# Altium schematic symbol library 8.0 - STM32.SCHLIB: 3 symbols
Pins are listed as number, name and electrical type; pins without a type are passive.

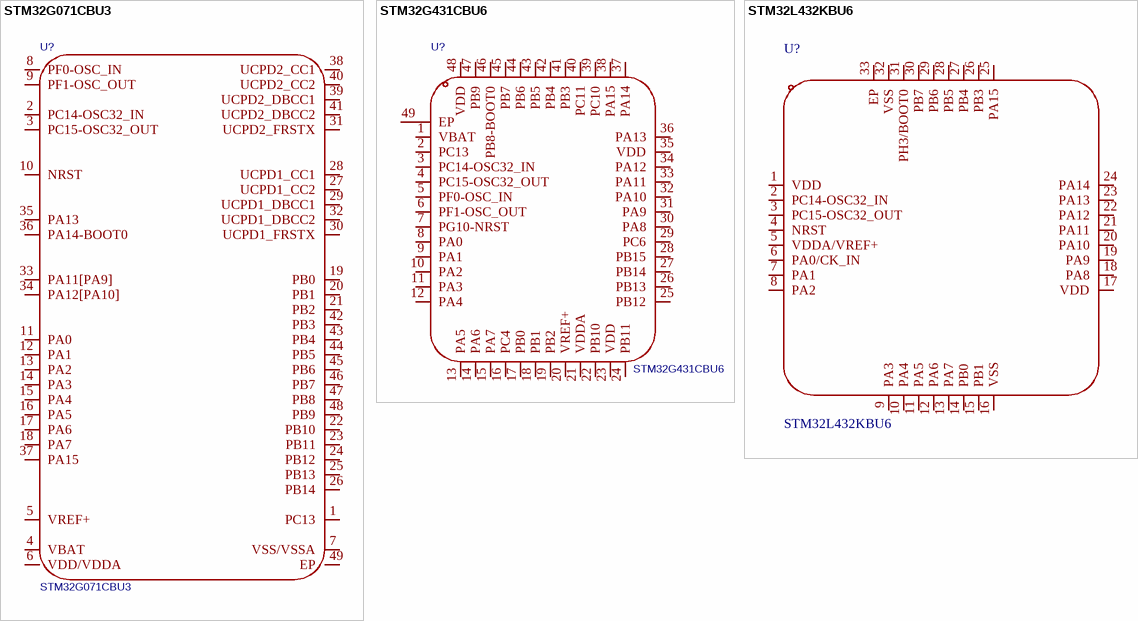
[diagram p0: symbols STM32G071CBU3 to STM32L432KBU6]

## STM32G071CBU3
designator U?
Manufacturer: ST(意法半导体); Device: STM32G071CBU3_1; AddInBom: yes; ModelId: 726e846686ee4a71b91fd16fb4ca286d聨0819f05c4eef4c71ace90d822a990e87; ModelName: UFQFPN-48_L7.0-W7.0-H0.6-P0.50; ModelTransform: 275.591,275.59,0,90,0,0,-0.003,-0.001,0; LCSC Part Name: STM32G071CBU3; SupplierPart: C724076; ManufacturerPart: STM32G071CBU3; Supplier Footprint: UFQFPN-48; JLCPCB Part Class: 扩展库; Datasheet: https://atta.szlcsc.com/upload/public/pdf/source/20200511/C529341_B4645443CFA701032F4478EC9851D5EF.pdf; Supplier: LCSC; ConvertToPcb: yes; SymbolName: STM32G071CBU3_1; FootprintName: UFQFPN-48_L7.0-W7.0-P0.50-BL-EP5.6
footprint VQFN-48_L7.0-W7.0-P0.50-BL-EP5.5
pins: 1 PC13, 2 PC14-OSC32_IN, 3 PC15-OSC32_OUT, 4 VBAT, 5 VREF+, 6 VDD/VDDA, 7 VSS/VSSA, 8 PF0-OSC_IN, 9 PF1-OSC_OUT, 10 NRST, 11 PA0, 12 PA1, 13 PA2, 14 PA3, 15 PA4, 16 PA5, 17 PA6, 18 PA7, 19 PB0, 20 PB1, 21 PB2, 22 PB10, 23 PB11, 24 PB12, 25 PB13, 26 PB14, 27 UCPD1_CC2, 28 UCPD1_CC1, 29 UCPD1_DBCC1, 30 UCPD1_FRSTX, 31 UCPD2_FRSTX, 32 UCPD1_DBCC2, 33 PA11[PA9], 34 PA12[PA10], 35 PA13, 36 PA14-BOOT0, 37 PA15, 38 UCPD2_CC1, 39 UCPD2_DBCC1, 40 UCPD2_CC2, 41 UCPD2_DBCC2, 42 PB3, 43 PB4, 44 PB5, 45 PB6, 46 PB7, 47 PB8, 48 PB9, 49 EP

## STM32G431CBU6
designator U?
CPU内核:ARM-M系列;CPU最大主频:170MHz;应用领域:-;; Manufacturer: ST(意法半导体); AddInBom: yes; ModelId: ba31957982b742979967eb5b855489b6; ModelName: VQFN-48_L7.0-W7.0-P0.50-BL-EP5.5; ModelTransform: 275.66874,275.66874,0,0,0,0,0,0,0; CPU Maximum Speed: 170MHz; Program Storage Size: 128KB; Program Memory Type: FLASH; Number of I/O: 42; ADC (Bit): 12bit; Voltage - Supply: 1.71V~3.6V; Symbol: STM32G431CBU6; Device: STM32G431CBU6; LCSC Part Name: 带DSP和FPU的170MHz主流ARM Cortex-M4 MCU，具有128 KB Flash存储器、数学加速器和中等模拟电平集成; SupplierPart: C529356; ManufacturerPart: STM32G431CBU6; Supplier Footprint: UFQFPN-48(7x7); JLCPCB Part Class: 扩展库; Datasheet: https://item.szlcsc.com/datasheet/STM32G431CBU6/549634.html; Supplier: LCSC; ConvertToPcb: yes; FootprintName: VQFN-48_L7.0-W7.0-P0.50-BL-EP5.5; CPU Core: ARM-M系列; DAC (Bit): 12bit; Applications: -
footprint VQFN-48_L7.0-W7.0-P0.50-BL-EP5.5
pins: 1 VBAT, 2 PC13, 3 PC14-OSC32_IN, 4 PC15-OSC32_OUT, 5 PF0-OSC_IN, 6 PF1-OSC_OUT, 7 PG10-NRST, 8 PA0, 9 PA1, 10 PA2, 11 PA3, 12 PA4, 13 PA5, 14 PA6, 15 PA7, 16 PC4, 17 PB0, 18 PB1, 19 PB2, 20 VREF+, 21 VDDA, 22 PB10, 23 VDD, 24 PB11, 25 PB12, 26 PB13, 27 PB14, 28 PB15, 29 PC6, 30 PA8, 31 PA9, 32 PA10, 33 PA11, 34 PA12, 35 VDD, 36 PA13, 37 PA14, 38 PA15, 39 PC10, 40 PC11, 41 PB3, 42 PB4, 43 PB5, 44 PB6, 45 PB7, 46 PB8-BOOT0, 47 PB9, 48 VDD, 49 EP

## STM32L432KBU6
designator U?
Manufacturer: ST(意法半导体); Add into BOM: yes; CPU Core: ARM-M4; CPU Maximum Speed: 80MHz; Program Storage Size: 128KB; Program Memory Type: FLASH; Number of I/O: 26; ADC (Bit): 12bit; Voltage - Supply: 1.71V~3.6V; Symbol: STM32L432KBU6; Device: STM32L432KBU6; LCSC Part Name: 带FPU的超低功耗80 Mhz Arm Cortex-M4 MCU，具有128-KB Flash存储器和USB; Supplier Part: C94784; Manufacturer Part: STM32L432KBU6; Supplier Footprint: UFQFPN-32(5x5); JLCPCB Part Class: 扩展库; Datasheet: https://item.szlcsc.com/datasheet/STM32L432KBU6/95984.html; Supplier: LCSC; Convert to PCB: yes; DAC (Bit): 12bit; Applications: -
footprint UFQFPN-32_L5.0-W5.0-P0.50-TL-EP3.5
3D model UFQFPN-32_L5.0-W5.0-H0.6-P0.50
pins: 1 VDD, 2 PC14-OSC32_IN, 3 PC15-OSC32_OUT, 4 NRST, 5 VDDA/VREF+, 6 PA0/CK_IN, 7 PA1, 8 PA2, 9 PA3, 10 PA4, 11 PA5, 12 PA6, 13 PA7, 14 PB0, 15 PB1, 16 VSS, 17 VDD, 18 PA8, 19 PA9, 20 PA10, 21 PA11, 22 PA12, 23 PA13, 24 PA14, 25 PA15, 26 PB3, 27 PB4, 28 PB5, 29 PB6, 30 PB7, 31 PH3/BOOT0, 32 VSS, 33 EP